# Altium schematic symbol library XMSM0L1105TDGS28R.SchLib: 1 symbol
Pins are listed as number, name and electrical type; pins without a type are passive.

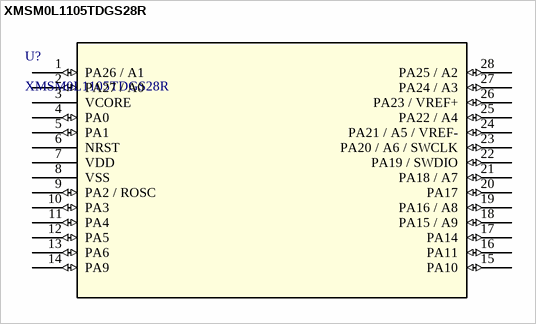
[diagram p0: symbol XMSM0L1105TDGS28R]

## XMSM0L1105TDGS28R
designator U?
32-MHz ArmÂ® CortexÂ®-M0+ MCU with 32-KB flash, 4-KB SRAM, 12-bit ADC 28-VSSOP -40 to 105; Manufacturer_Name: Texas Instruments; Type: Embedded; Copyright: Copyright (C) 2026 Ultra Librarian. All rights reserved.; Manufacturer_Part_Number: XMSM0L1105TDGS28R; RefDes: RefDes
footprint VSSOP28_DGS_TEX
pins: 1 PA26 / A1 (io), 2 PA27 / A0 (io), 3 VCORE (power), 4 PA0 (io), 5 PA1 (io), 6 NRST, 7 VDD (power), 8 VSS (power), 9 PA2 / ROSC (io), 10 PA3 (io), 11 PA4 (io), 12 PA5 (io), 13 PA6 (io), 14 PA9 (io), 15 PA10 (io), 16 PA11 (io), 17 PA14 (io), 18 PA15 / A9 (io), 19 PA16 / A8 (io), 20 PA17 (io), 21 PA18 / A7 (io), 22 PA19 / SWDIO (io), 23 PA20 / A6 / SWCLK (io), 24 PA21 / A5 / VREF- (io), 25 PA22 / A4 (io), 26 PA23 / VREF+ (io), 27 PA24 / A3 (io), 28 PA25 / A2 (io)